# Altium footprint library 网口RJ45 Bel SI-46001-F.PcbLib: 1 footprints
Each footprint in its own frame and in the unit in brackets; x right, y up, seen from the top. Pads: shape width x height; smd on the part's side, far side on the other; paste and mask are expansions set on the pad; w line width, h text height; cw(c..) or ccw(c..) is an arc to the next point about the centre after c.
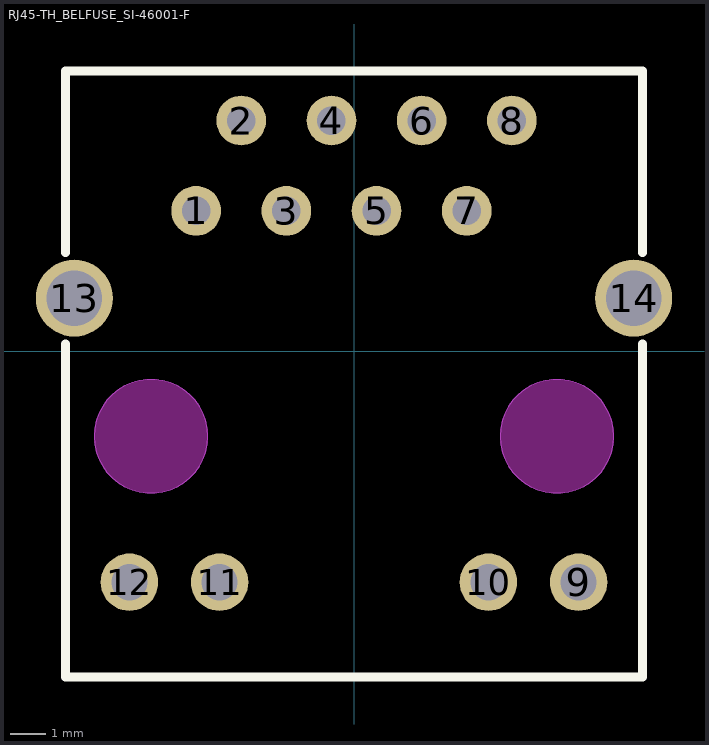
[diagram p0: the footprint, top view; thin cyan lines are the x and y axes]

## RJ45-TH_BELFUSE_SI-46001-F [mm]
pads (14):
  round 1.4 hole 0.8: 1(-4.445,3.96) 2(-3.175,6.5) 3(-1.905,3.96) 4(-0.635,6.5) 5(0.635,3.96) 6(1.905,6.5) 7(3.175,3.96) 8(4.445,6.5)
  round 1.62 hole 1.02: 9(6.325,-6.5) 10(3.785,-6.5) 11(-3.785,-6.5) 12(-6.325,-6.5)
  round 2.17 hole 1.57: 13(-7.875,1.5) 14(7.875,1.5)
Top Overlay:
  lines w0.254: -8.13,0.209 -8.13,-9.17 8.13,-9.17 8.13,0.209 ; -8.13,2.791 -8.13,7.897 ; -8.128,7.897 8.13,7.897 8.13,2.791
Keep-Out Layer:
  board cut-out: 7.315,-2.39 7.315,-2.548 7.254,-2.857 7.133,-3.148 6.958,-3.41 6.735,-3.633 6.473,-3.808 6.182,-3.928 5.873,-3.99 5.557,-3.99 5.248,-3.928 4.957,-3.808 4.695,-3.633 4.472,-3.41 4.297,-3.148 4.176,-2.857 4.115,-2.548 4.115,-2.39 4.115,-2.232 4.176,-1.923 4.297,-1.632 4.472,-1.37 4.695,-1.147 4.957,-0.972 5.248,-0.851 5.557,-0.79 5.873,-0.79 6.182,-0.851 6.473,-0.972 6.735,-1.147 6.958,-1.37 7.133,-1.632 7.254,-1.923 7.315,-2.232 7.315,-2.39
  board cut-out: -4.115,-2.39 -4.115,-2.548 -4.176,-2.857 -4.297,-3.148 -4.472,-3.41 -4.695,-3.633 -4.957,-3.808 -5.248,-3.928 -5.557,-3.99 -5.873,-3.99 -6.182,-3.928 -6.473,-3.808 -6.735,-3.633 -6.958,-3.41 -7.133,-3.148 -7.254,-2.857 -7.315,-2.548 -7.315,-2.39 -7.315,-2.232 -7.254,-1.923 -7.133,-1.632 -6.958,-1.37 -6.735,-1.147 -6.473,-0.972 -6.182,-0.851 -5.873,-0.79 -5.557,-0.79 -5.248,-0.851 -4.957,-0.972 -4.695,-1.147 -4.472,-1.37 -4.297,-1.632 -4.176,-1.923 -4.115,-2.232 -4.115,-2.39
Keep-Out Layer:
  drawing of 6 lines, arcs and shapes, not listed
Mechanical 1:
  circle w0.003: c5.715,-2.39 r1.6
  circle w0.003: c-5.715,-2.39 r1.6